# Altium footprint library PCB1.PcbLib: 53 footprints (part 4 of 4)
Each footprint in its own frame and in the unit in brackets; x right, y up, seen from the top. Pads: shape width x height; smd on the part's side, far side on the other; paste and mask are expansions set on the pad; w line width, h text height; cw(c..) or ccw(c..) is an arc to the next point about the centre after c.
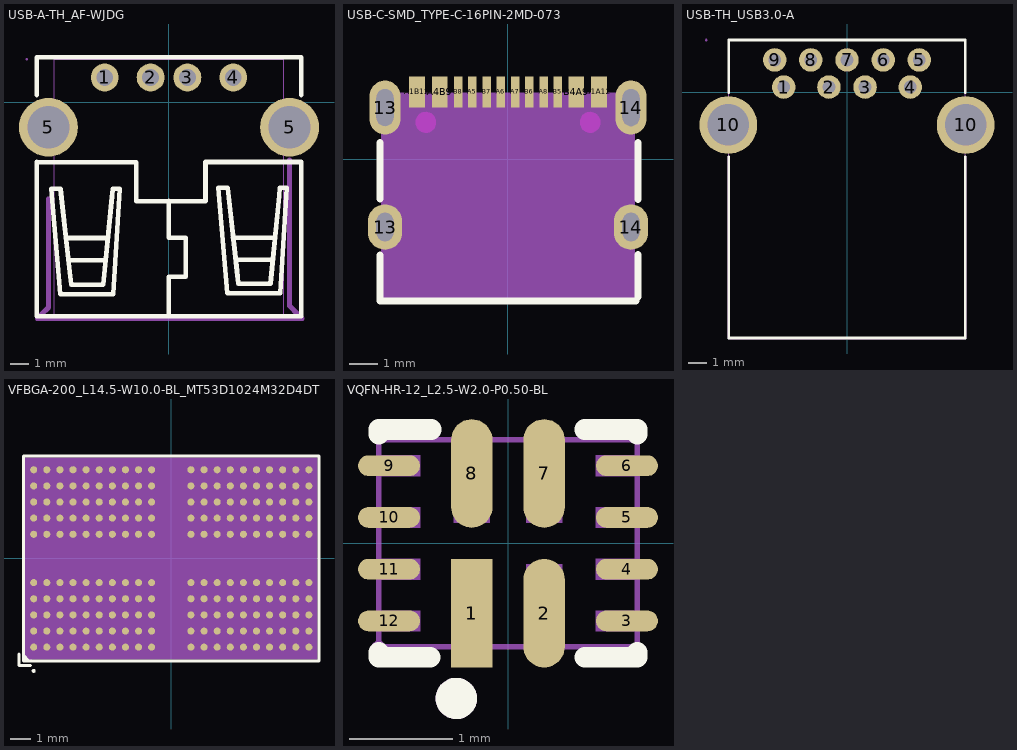
[diagram p3: the footprints below, top view; thin cyan lines are the x and y axes]

## USB-A-TH_AF-WJDG [mm]
pads (6):
  round 1.52 hole 0.92 paste-2539.97 mask+0.05: 1(-3.5,1.355) 2(-1,1.355) 3(1,1.355) 4(3.5,1.355)
  round 3.2 hole 2.3 paste-2539.97 mask+0.05: 5(-6.57,-1.355) 5(6.57,-1.355)
Top Overlay:
  lines w0.254: -7.199,-3.236 -7.199,-11.655 7.201,-11.655 7.201,-3.236 ; -7.199,0.404 -7.199,2.46 7.201,2.46 7.201,0.404 ; -7.19,-3.266 -1.79,-3.266 -1.79,-5.385 1.99,-5.385 1.99,-3.245 7.19,-3.245 ; -5.609,-7.385 -3.349,-7.385 ; -5.469,-8.595 -3.439,-8.595 ; -0.01,-11.525 -0.01,-9.495 0.91,-9.495 0.91,-7.376 -0.01,-7.376 -0.01,-5.355 ; 3.49,-7.366 5.75,-7.366 ; 3.63,-8.576 5.66,-8.576 ; -6.42,-4.706 -5.925,-10.441 -3.041,-10.452 -2.691,-4.709 -3.072,-4.709 -3.102,-5.139 -3.576,-9.917 -5.325,-9.928 -5.401,-9.25 -5.911,-4.71 -6.42,-4.706 ; 2.682,-4.652 3.177,-10.387 6.06,-10.398 6.41,-4.655 6.03,-4.655 6,-5.085 5.526,-9.864 3.776,-9.874 3.701,-9.196 3.19,-4.656 2.682,-4.652
Mechanical 6:
  region: -6.443,-5.27 -6.443,-11.17 -6.453,-11.219 -6.48,-11.26 -6.863,-11.643 6.943,-11.643 6.47,-11.17 6.443,-11.129 6.433,-11.08 6.433,-3.14 6.443,-3.091 6.47,-3.05 6.511,-3.023 6.56,-3.013 6.609,-3.023 6.65,-3.05 6.677,-3.091 6.687,-3.14 6.687,-11.027 7.34,-11.68 7.367,-11.721 7.377,-11.77 7.367,-11.819 7.34,-11.86 7.299,-11.887 7.25,-11.897 -7.17,-11.897 -7.219,-11.887 -7.26,-11.86 -7.287,-11.819 -7.297,-11.77 -7.287,-11.721 -7.26,-11.68 -6.697,-11.117 -6.697,-5.27 -6.687,-5.221 -6.66,-5.18 -6.619,-5.153 -6.57,-5.143 -6.521,-5.153 -6.48,-5.18 -6.453,-5.221
Mechanical 7:
  lines w0.051: -6.25,-11.655 -6.25,2.345 6.25,2.345 6.25,-11.655 -6.25,-11.655
Mechanical 8:
  region: -7.75,2.285 -7.775,2.285 -7.81,2.32 -7.81,2.37 -7.775,2.405 -7.75,2.405 -7.725,2.405 -7.69,2.37 -7.69,2.32 -7.725,2.285 -7.75,2.285
Mechanical 9:
  region: -3.8,1.205 -3.8,1.505 -3.2,1.505 -3.2,1.205
  region: -1.3,1.205 -1.3,1.505 -0.7,1.505 -0.7,1.205
  region: 0.7,1.205 0.7,1.505 1.3,1.505 1.3,1.205
  region: 3.2,1.205 3.2,1.505 3.8,1.505 3.8,1.205
  region: 6.32,-0.605 6.82,-0.605 6.82,-2.105 6.32,-2.105
  region: -6.82,-0.605 -6.32,-0.605 -6.32,-2.105 -6.82,-2.105
Mechanical 10:
  region: 6.24,-0.605 7.75,-0.605 7.75,-2.105 6.24,-2.105
  region: -6.24,-2.105 -7.75,-2.105 -7.75,-0.605 -6.24,-0.605
3D body "C456018.step": height 7.64, standoff -3.87, extent -7.75,-12.095 7.75,1.905

## USB-C-SMD_TYPE-C-16PIN-2MD-073 [mm]
pads (16):
  oval 1.2x1.6 hole 0.6 slot 1 at 90 deg paste-2539.97 mask+0.05: 13(-4.325,-2.375) 14(4.325,-2.375)
  oval 1.1x1.9 hole 0.6 slot 1.3 at 90 deg paste-2539.97 mask+0.05: 13(-4.325,1.825) 14(4.325,1.825)
  rect 0.55x1.1 smd paste+0 mask+0.05: A1B12(-3.2,2.375) A4B9(-2.4,2.375) B1A12(3.2,2.375) B4A9(2.4,2.375)
  rect 0.3x1.1 smd paste+0 mask+0.05: A5(-1.25,2.375) A6(-0.25,2.375) A7(0.25,2.375) A8(1.25,2.375) B5(1.75,2.375) B6(0.75,2.375) B7(-0.75,2.375) B8(-1.75,2.375)
Top Overlay:
  lines w0.254: -4.5,-3.356 -4.5,-4.975 4.5,-4.975 ; -4.5,-1.394 -4.5,0.594 ; 4.572,-4.826 4.572,-3.353 ; 4.572,-1.397 4.572,0.597
Keep-Out Layer:
  board cut-out: 2.89,0.955 2.821,0.955 2.692,1.008 2.593,1.107 2.54,1.235 2.54,1.375 2.593,1.503 2.692,1.602 2.821,1.655 2.89,1.655 2.96,1.655 3.088,1.602 3.187,1.503 3.24,1.375 3.24,1.235 3.187,1.107 3.088,1.008 2.96,0.955 2.89,0.955
  board cut-out: -2.89,0.955 -2.96,0.955 -3.088,1.008 -3.187,1.107 -3.24,1.235 -3.24,1.375 -3.187,1.503 -3.088,1.602 -2.96,1.655 -2.89,1.655 -2.82,1.655 -2.692,1.602 -2.593,1.503 -2.54,1.375 -2.54,1.235 -2.593,1.107 -2.692,1.008 -2.82,0.955 -2.89,0.955
Keep-Out Layer:
  circle w0.003: c2.89,1.305 r0.35
  circle w0.003: c-2.89,1.305 r0.35
  region: 2.89,0.955 2.812,0.964 2.738,0.99 2.672,1.031 2.616,1.087 2.575,1.153 2.549,1.227 2.54,1.305 2.549,1.383 2.575,1.457 2.616,1.523 2.672,1.579 2.738,1.62 2.812,1.646 2.89,1.655 2.968,1.646 3.042,1.62 3.108,1.579 3.164,1.523 3.205,1.457 3.231,1.383 3.24,1.305 3.231,1.227 3.205,1.153 3.164,1.087 3.108,1.031 3.042,0.99 2.968,0.964
  region: 2.89,0.955 2.821,0.955 2.692,1.008 2.593,1.107 2.54,1.235 2.54,1.375 2.593,1.503 2.692,1.602 2.821,1.655 2.89,1.655 2.96,1.655 3.088,1.602 3.187,1.503 3.24,1.375 3.24,1.235 3.187,1.107 3.088,1.008 2.96,0.955 2.89,0.955
  region: -2.89,0.955 -2.968,0.964 -3.042,0.99 -3.108,1.031 -3.164,1.087 -3.205,1.153 -3.231,1.227 -3.24,1.305 -3.231,1.383 -3.205,1.457 -3.164,1.523 -3.108,1.579 -3.042,1.62 -2.968,1.646 -2.89,1.655 -2.812,1.646 -2.738,1.62 -2.672,1.579 -2.616,1.523 -2.575,1.457 -2.549,1.383 -2.54,1.305 -2.549,1.227 -2.575,1.153 -2.616,1.087 -2.672,1.031 -2.738,0.99 -2.812,0.964
  region: -2.89,0.955 -2.96,0.955 -3.088,1.008 -3.187,1.107 -3.24,1.235 -3.24,1.375 -3.187,1.503 -3.088,1.602 -2.96,1.655 -2.89,1.655 -2.82,1.655 -2.692,1.602 -2.593,1.503 -2.54,1.375 -2.54,1.235 -2.593,1.107 -2.692,1.008 -2.82,0.955 -2.89,0.955
Mechanical 1:
  circle w0.003: c2.89,1.305 r0.35
  circle w0.003: c-2.89,1.305 r0.35
Mechanical 6:
  circle w0.25: c2.89,1.305 r0.125
  circle w0.25: c-2.89,1.305 r0.125
Mechanical 7:
  region: -4.45,-5.001 -4.45,2.349 4.45,2.349 4.45,-5.001
Mechanical 8:
  region: -4.45,2.619 -4.462,2.619 -4.48,2.637 -4.48,2.662 -4.462,2.679 -4.45,2.679 -4.438,2.679 -4.42,2.662 -4.42,2.637 -4.438,2.619 -4.45,2.619
Mechanical 9:
  region: -4.475,-1.975 -4.175,-1.975 -4.175,-2.775 -4.475,-2.775
  region: 4.175,-1.975 4.475,-1.975 4.475,-2.775 4.175,-2.775
  region: 4.175,2.375 4.475,2.375 4.475,1.275 4.175,1.275
  region: -4.45,2.349 -4.2,2.349 -4.2,1.249 -4.45,1.249
  region: 3,2.649 3.4,2.649 3.4,1.799 3,1.799
  region: 2.2,2.649 2.6,2.649 2.6,1.799 2.2,1.799
  region: -2.6,2.649 -2.2,2.649 -2.2,1.799 -2.6,1.799
  region: -3.4,2.649 -3,2.649 -3,1.799 -3.4,1.799
  region: 1.65,2.649 1.85,2.649 1.85,1.799 1.65,1.799
  region: 1.15,2.649 1.35,2.649 1.35,1.799 1.15,1.799
  region: 0.65,2.649 0.85,2.649 0.85,1.799 0.65,1.799
  region: 0.15,2.649 0.35,2.649 0.35,1.799 0.15,1.799
  region: -0.35,2.649 -0.15,2.649 -0.15,1.799 -0.35,1.799
  region: -1.35,2.649 -1.15,2.649 -1.15,1.799 -1.35,1.799
  region: -0.85,2.649 -0.65,2.649 -0.65,1.799 -0.85,1.799
  region: -1.85,2.649 -1.65,2.649 -1.65,1.799 -1.85,1.799
3D body "C2765186.step": height 3.16, standoff -1.01, extent -4.445,-5.04 4.495,2.54

## USB-TH_USB3.0-A [mm]
pads (11):
  round 1.3 hole 0.7 paste-2539.97 mask+0.05: 1(-3.5,0.3) 2(-1,0.3) 3(1,0.3) 4(3.5,0.3) 5(4,1.8) 6(2,1.8) 7(0,1.8) 8(-2,1.8) 9(-4,1.8)
  round 3.2 hole 2.3 paste-2539.97 mask+0.05: 10(-6.57,-1.8) 10(6.57,-1.8)
Top Overlay:
  lines w0.152: -6.55,-3.58 -6.55,-13.6 6.55,-13.6 6.55,-3.58 ; -6.55,-0.02 -6.55,2.9 6.55,2.9 6.55,-0.02
Mechanical 6:
  region: -6.6,-3.6 -6.6,-13.6 -6.55,-13.65 6.55,-13.65 6.6,-13.6 6.6,-3.55 6.5,-3.55 6.5,-13.55 -6.5,-13.55 -6.5,-3.55 -6.6,-3.55
Mechanical 7:
  lines w0.051: -6.55,-13.6 6.55,-13.6 6.55,2.9 -6.55,2.9 -6.55,-13.6
Mechanical 8:
  region: -7.8,2.84 -7.825,2.84 -7.86,2.875 -7.86,2.925 -7.825,2.96 -7.8,2.96 -7.775,2.96 -7.74,2.925 -7.74,2.875 -7.775,2.84 -7.8,2.84
Mechanical 9:
  region: 6.72,-1.05 6.72,-2.55 6.42,-2.55 6.42,-1.05
  region: -6.72,-2.55 -6.72,-1.05 -6.42,-1.05 -6.42,-2.55
  region: -4.225,1.95 -3.775,1.95 -3.775,1.65 -4.225,1.65
  region: -2.225,1.95 -1.775,1.95 -1.775,1.65 -2.225,1.65
  region: -0.225,1.95 0.225,1.95 0.225,1.65 -0.225,1.65
  region: 1.775,1.95 2.225,1.95 2.225,1.65 1.775,1.65
  region: 3.775,1.95 4.225,1.95 4.225,1.65 3.775,1.65
  region: 3.275,0.45 3.725,0.45 3.725,0.15 3.275,0.15
  region: 0.775,0.45 1.225,0.45 1.225,0.15 0.775,0.15
  region: -1.225,0.45 -0.775,0.45 -0.775,0.15 -1.225,0.15
  region: -3.725,0.45 -3.275,0.45 -3.275,0.15 -3.725,0.15
Mechanical 10:
  region: -6.55,-2.55 -6.42,-2.55 -6.42,-1.05 -7.8,-1.05 -7.8,-2.55
  region: 6.55,-1.05 6.42,-1.05 6.42,-2.55 7.8,-2.55 7.8,-1.05
3D body "C7501850.step": height 7, standoff -3.6, extent -7.798,-13.607 7.798,3.193

## VFBGA-200_L14.5-W10.0-BL_MT53D1024M32D4DT [mm]
pads (200):
  round 0.35 smd paste+0 mask+0.05: A1(-6.825,-4.4) A2(-6.825,-3.6) A3(-6.825,-2.8) A4(-6.825,-2) A5(-6.825,-1.2) A8(-6.825,1.2) A9(-6.825,2) A10(-6.825,2.8) A11(-6.825,3.6) A12(-6.825,4.4) AA1(6.175,-4.4) AA2(6.175,-3.6) AA3(6.175,-2.8) AA4(6.175,-2) AA5(6.175,-1.2) AA8(6.175,1.2) AA9(6.175,2) AA10(6.175,2.8) AA11(6.175,3.6) AA12(6.175,4.4) AB1(6.825,-4.4) AB2(6.825,-3.6) AB3(6.825,-2.8) AB4(6.825,-2) AB5(6.825,-1.2) AB8(6.825,1.2) AB9(6.825,2) AB10(6.825,2.8) AB11(6.825,3.6) AB12(6.825,4.4) B1(-6.175,-4.4) B2(-6.175,-3.6) B3(-6.175,-2.8) B4(-6.175,-2) B5(-6.175,-1.2) B8(-6.175,1.2) B9(-6.175,2) B10(-6.175,2.8) B11(-6.175,3.6) B12(-6.175,4.4) C1(-5.525,-4.4) C2(-5.525,-3.6) C3(-5.525,-2.8) C4(-5.525,-2) C5(-5.525,-1.2) C8(-5.525,1.2) C9(-5.525,2) C10(-5.525,2.8) C11(-5.525,3.6) C12(-5.525,4.4) D1(-4.875,-4.4) D2(-4.875,-3.6) D3(-4.875,-2.8) D4(-4.875,-2) D5(-4.875,-1.2) D8(-4.875,1.2) D9(-4.875,2) D10(-4.875,2.8) D11(-4.875,3.6) D12(-4.875,4.4) E1(-4.225,-4.4) E2(-4.225,-3.6) E3(-4.225,-2.8) E4(-4.225,-2) E5(-4.225,-1.2) E8(-4.225,1.2) E9(-4.225,2) E10(-4.225,2.8) E11(-4.225,3.6) E12(-4.225,4.4) F1(-3.575,-4.4) F2(-3.575,-3.6) F3(-3.575,-2.8) F4(-3.575,-2) F5(-3.575,-1.2) F8(-3.575,1.2) F9(-3.575,2) F10(-3.575,2.8) F11(-3.575,3.6) F12(-3.575,4.4) G1(-2.925,-4.4) G2(-2.925,-3.6) G3(-2.925,-2.8) G4(-2.925,-2) G5(-2.925,-1.2) G8(-2.925,1.2) G9(-2.925,2) G10(-2.925,2.8) G11(-2.925,3.6) G12(-2.925,4.4) H1(-2.275,-4.4) H2(-2.275,-3.6) H3(-2.275,-2.8) H4(-2.275,-2) H5(-2.275,-1.2) H8(-2.275,1.2) H9(-2.275,2) H10(-2.275,2.8) H11(-2.275,3.6) H12(-2.275,4.4) J1(-1.625,-4.4) J2(-1.625,-3.6) J3(-1.625,-2.8) J4(-1.625,-2) J5(-1.625,-1.2) J8(-1.625,1.2) J9(-1.625,2) J10(-1.625,2.8) J11(-1.625,3.6) J12(-1.625,4.4) K1(-0.975,-4.4) K2(-0.975,-3.6) K3(-0.975,-2.8) K4(-0.975,-2) K5(-0.975,-1.2) K8(-0.975,1.2) K9(-0.975,2) K10(-0.975,2.8) K11(-0.975,3.6) K12(-0.975,4.4) N1(0.975,-4.4) N2(0.975,-3.6) N3(0.975,-2.8) N4(0.975,-2) N5(0.975,-1.2) N8(0.975,1.2) N9(0.975,2) N10(0.975,2.8) N11(0.975,3.6) N12(0.975,4.4) P1(1.625,-4.4) P2(1.625,-3.6) P3(1.625,-2.8) P4(1.625,-2) P5(1.625,-1.2) P8(1.625,1.2) P9(1.625,2) P10(1.625,2.8) P11(1.625,3.6) P12(1.625,4.4) R1(2.275,-4.4) R2(2.275,-3.6) R3(2.275,-2.8) R4(2.275,-2) R5(2.275,-1.2) R8(2.275,1.2) R9(2.275,2) R10(2.275,2.8) R11(2.275,3.6) R12(2.275,4.4) T1(2.925,-4.4) T2(2.925,-3.6) T3(2.925,-2.8) T4(2.925,-2) T5(2.925,-1.2) T8(2.925,1.2) T9(2.925,2) T10(2.925,2.8) T11(2.925,3.6) T12(2.925,4.4) U1(3.575,-4.4) U2(3.575,-3.6) U3(3.575,-2.8) U4(3.575,-2) U5(3.575,-1.2) U8(3.575,1.2) U9(3.575,2) U10(3.575,2.8) U11(3.575,3.6) U12(3.575,4.4) V1(4.225,-4.4) V2(4.225,-3.6) V3(4.225,-2.8) V4(4.225,-2) V5(4.225,-1.2) V8(4.225,1.2) V9(4.225,2) V10(4.225,2.8) V11(4.225,3.6) V12(4.225,4.4) W1(4.875,-4.4) W2(4.875,-3.6) W3(4.875,-2.8) W4(4.875,-2) W5(4.875,-1.2) W8(4.875,1.2) W9(4.875,2) W10(4.875,2.8) W11(4.875,3.6) W12(4.875,4.4) Y1(5.525,-4.4) Y2(5.525,-3.6) Y3(5.525,-2.8) Y4(5.525,-2) Y5(5.525,-1.2) Y8(5.525,1.2) Y9(5.525,2) Y10(5.525,2.8) Y11(5.525,3.6) Y12(5.525,4.4)
Top Overlay:
  circle w0.1: c-6.825,-5.576 r0.05
  region: -7.326,-5.076 -6.986,-5.076 -7.326,-4.736
  lines w0.152: -7.555,-4.736 -7.555,-5.305 -6.986,-5.305 ; -7.326,-5.076 -7.326,5.076 7.326,5.076 7.326,-5.076 -7.326,-5.076
Mechanical 6:
  region: -7.366,-4.572 -7.366,-5.08 -6.858,-5.08
Mechanical 7:
  region: -7.25,-5 -7.25,5 7.25,5 7.25,-5
Mechanical 8:
  region: -7.22,-5 -7.22,-5.012 -7.238,-5.03 -7.262,-5.03 -7.28,-5.012 -7.28,-5 -7.28,-4.988 -7.262,-4.97 -7.238,-4.97 -7.22,-4.988 -7.22,-5
Mechanical 10:
  drawing of 200 lines, arcs and shapes, not listed
3D body "C2911184.step": height 0.71, standoff -0.38, extent -7.25,-5 7.25,5

## VQFN-HR-12_L2.5-W2.0-P0.50-BL [mm]
pads (12):
  rect 0.4x1.05 smd: 1(-0.35,-0.675)
  oval 0.4x1.05 smd: 2(0.35,-0.675) 7(0.35,0.675) 8(-0.35,0.675)
  oval 0.6x0.2 smd: 3(1.15,-0.75) 4(1.15,-0.25) 5(1.15,0.25) 6(1.15,0.75) 9(-1.15,0.75) 10(-1.15,0.25) 11(-1.15,-0.25) 12(-1.15,-0.75)
Top Overlay:
  circle w0.2: c-0.5,-1.5 r0.1
  lines w0.2: -1.25,-1.054 -1.25,-1.1 -0.754,-1.1 ; -1.25,1.054 -1.25,1.1 -0.742,1.1 ; 0.741,-1.1 1.25,-1.1 1.25,-1.054 ; 0.741,1.1 1.25,1.1 1.25,1.054
Mechanical 6:
  circle w0.2: c-0.5,-1.5 r0.1
Mechanical 7:
  lines w0.051: -1.25,-1 -1.25,1 1.25,1 1.25,-0.94 1.25,-1 -1.25,-1
Mechanical 8:
  region: -1.19,-1 -1.19,-1.025 -1.225,-1.06 -1.275,-1.06 -1.31,-1.025 -1.31,-1 -1.31,-0.975 -1.275,-0.94 -1.225,-0.94 -1.19,-0.975 -1.19,-1
Mechanical 9:
  region: 0.175,0.2 0.175,1 0.525,1 0.525,0.2
  region: -0.525,0.2 -0.525,1 -0.175,1 -0.175,0.2
  region: -0.525,-1 -0.525,-0.2 -0.175,-0.2 -0.175,-1
  region: 0.175,-1 0.175,-0.2 0.525,-0.2 0.525,-1
  region: 0.85,0.85 1.25,0.85 1.25,0.65 0.85,0.65
  region: 0.85,0.35 1.25,0.35 1.25,0.15 0.85,0.15
  region: 0.85,-0.15 1.25,-0.15 1.25,-0.35 0.85,-0.35
  region: 0.85,-0.65 1.25,-0.65 1.25,-0.85 0.85,-0.85
  region: -1.25,-0.65 -0.85,-0.65 -0.85,-0.85 -1.25,-0.85
  region: -1.25,-0.15 -0.85,-0.15 -0.85,-0.35 -1.25,-0.35
  region: -1.25,0.35 -0.85,0.35 -0.85,0.15 -1.25,0.15
  region: -1.25,0.85 -0.85,0.85 -0.85,0.65 -1.25,0.65
3D body "C485916.step": height 1, standoff 0, extent -1.23,-0.984 1.27,1.016